# Altium schematic symbol library LMS78_05-2.0R.SchLib: 1 symbol
Pins are listed as number, name and electrical type; pins without a type are passive.

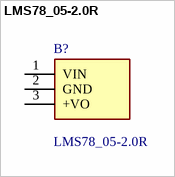
[diagram p0: symbol LMS78_05-2.0R]

## LMS78_05-2.0R
designator B?
Non-Isolated PoL Module DC DC Converter 1 Output 5V 2A 8V - 36V Input; Manufacturer_Name: Gaptec; Geometry.Height: 17.75mm; TME Electronic Components Part Number: *; TME Electronic Components Price/Stock: *; Manufacturer_Part_Number: LMS78_05-2.0R; Datasheet Link: https://gaptec-electronic.com/datenblaetter/LMS78_2.0R.pdf
footprint LMS78_0520R
pins: 1 VIN, 2 GND, 3 +VO